# Altium footprint library Tony_.PcbLib: 94 footprints (part 5 of 6)
Each footprint in its own frame and in the unit in brackets; x right, y up, seen from the top. Pads: shape width x height; smd on the part's side, far side on the other; paste and mask are expansions set on the pad; w line width, h text height; cw(c..) or ccw(c..) is an arc to the next point about the centre after c.
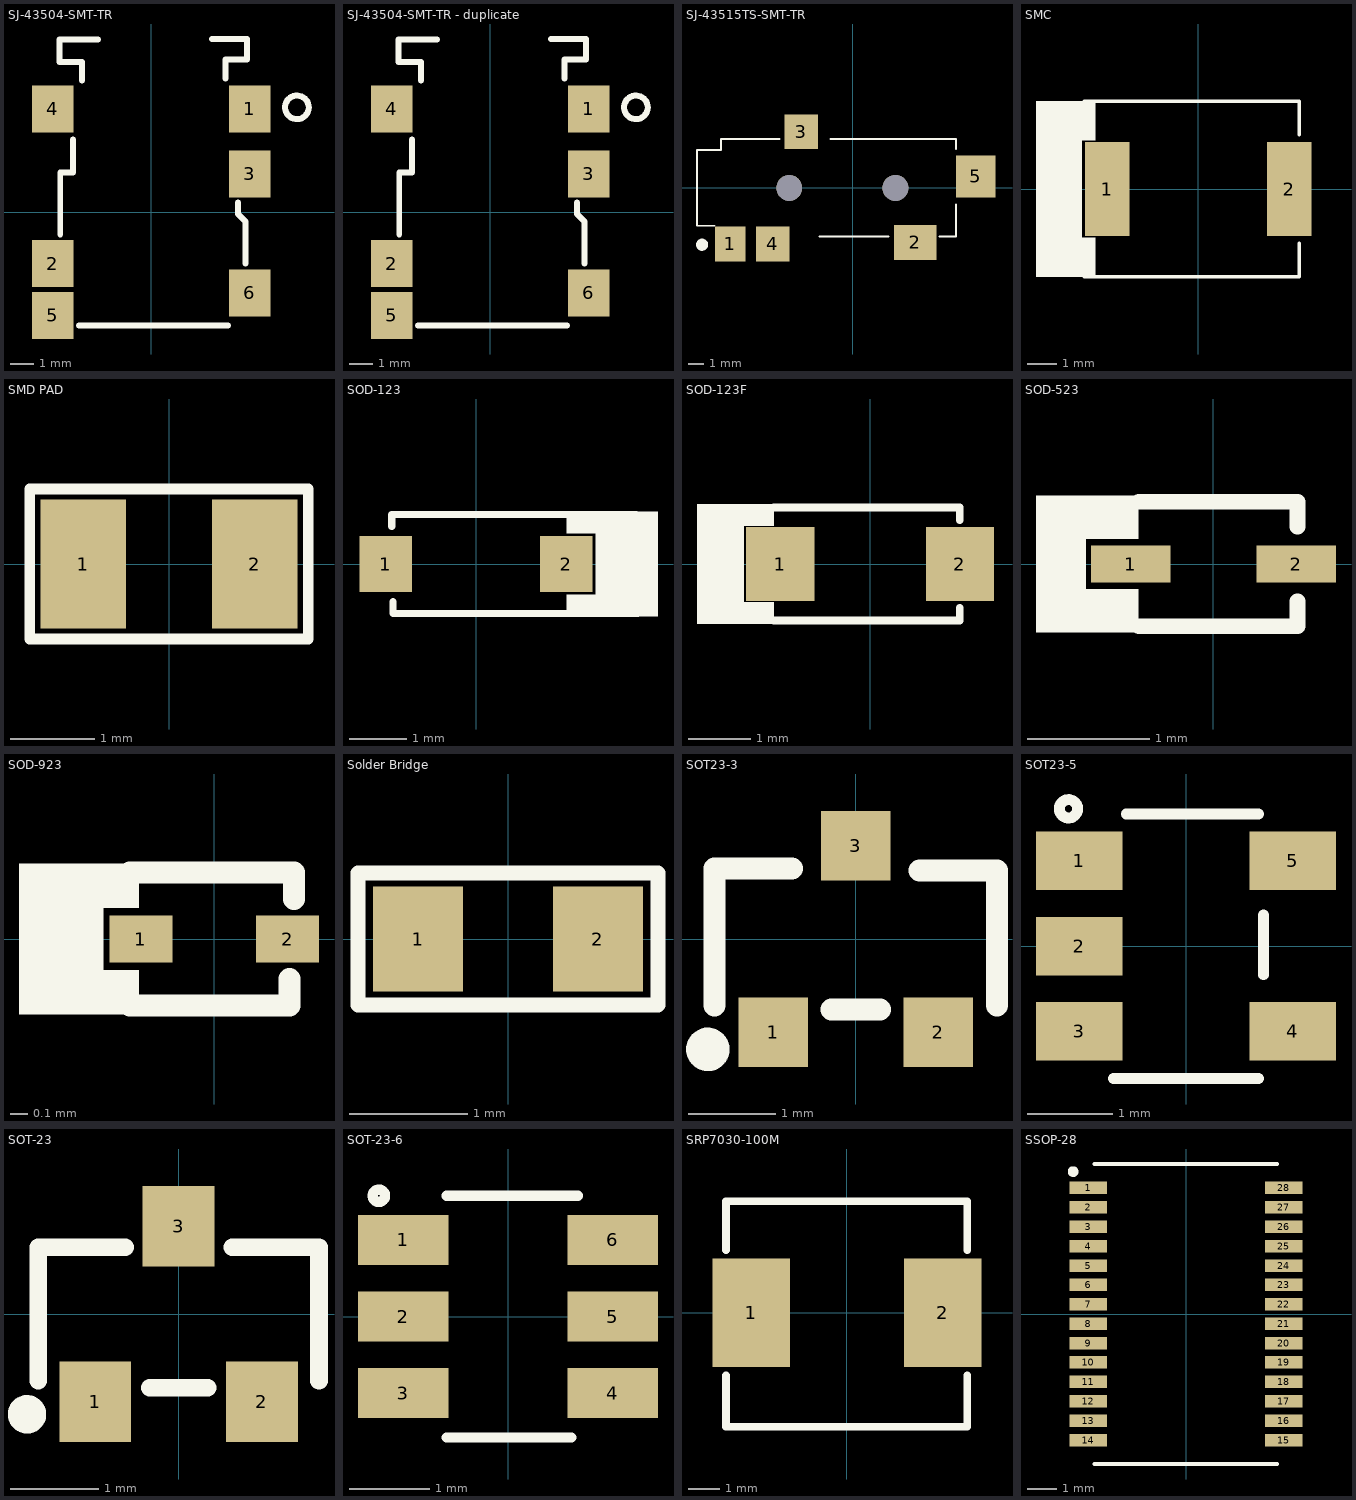
[diagram p4: the footprints below, top view; thin cyan lines are the x and y axes]

## SJ-43504-SMT-TR [mm] "CONN JACK 4COND 3.5MM SMD R/A"
pads (6):
  rect 1.75x2 smd: 1(4.175,4.375) 2(-4.175,-2.175) 3(4.175,1.625) 4(-4.175,4.375) 5(-4.175,-4.375) 6(4.175,-3.425)
Top Overlay:
  circle w0.254: c6.172,4.445 r0.5
  lines w0.254: -3.861,-0.94 -3.861,1.676 -3.327,1.676 -3.327,3.083 ; -3.067,-4.801 3.258,-4.801 ; -2.946,5.588 -2.946,6.375 -3.886,6.375 -3.886,7.324 -2.261,7.324 ; 2.565,7.341 4.064,7.341 4.064,6.477 3.15,6.477 3.15,5.664 ; 3.683,0.411 3.683,-0.08 3.988,-0.384 3.988,-2.167
3D body "CUI_DEVICES_SJ-43504-SMT-TR.step": height 3.2, standoff -1.8, extent -4.325,-4.308 4.775,9.692

## SJ-43504-SMT-TR - duplicate [mm] "CONN JACK 4COND 3.5MM SMD R/A"
pads (6):
  rect 1.75x2 smd: 1(4.175,4.375) 2(-4.175,-2.175) 3(4.175,1.625) 4(-4.175,4.375) 5(-4.175,-4.375) 6(4.175,-3.425)
Top Overlay:
  circle w0.254: c6.172,4.445 r0.5
  lines w0.254: -3.861,-0.94 -3.861,1.676 -3.327,1.676 -3.327,3.083 ; -3.067,-4.801 3.258,-4.801 ; -2.946,5.588 -2.946,6.375 -3.886,6.375 -3.886,7.324 -2.261,7.324 ; 2.565,7.341 4.064,7.341 4.064,6.477 3.15,6.477 3.15,5.664 ; 3.683,0.411 3.683,-0.08 3.988,-0.384 3.988,-2.167
3D body "CUI_DEVICES_SJ-43504-SMT-TR.step": height 3.2, standoff -1.8, extent -4.474,-4.801 4.626,9.199

## SJ-43515TS-SMT-TR [mm]
pads (7):
  rect 2x2.3 smd: 1(-8.1,-3.7)
  rect 2.8x2.3 smd: 2(4.1,-3.6)
  rect 2.2x2.3 smd: 3(-3.4,3.7) 4(-5.3,-3.7)
  rect 2.6x2.8 smd: 5(8.1,0.75)
  round 1.7 hole 1.7 unplated: ""(-4.2,0) ""(2.8,0)
Top Overlay:
  circle w0.4: c-9.95,-3.75 r0.2
  lines w0.127: -9.116,-2.5 -10.284,-2.5 -10.284,2.5 -8.7,2.5 -8.7,3.209 -4.825,3.209 ; -2.207,-3.217 2.339,-3.217 ; -1.496,3.209 6.8,3.209 6.8,2.55 ; 5.692,-3.217 6.8,-3.217 6.8,-1.1
3D body "CUI_DEVICES_SJ-43515TS-SMT-TR.step": height 5.3, standoff -0.5, extent -10.436,-4.547 8.764,4.453

## SMC [mm]
pads (2):
  rect 1.52x3.2 smd: 1(-3.105,0) 2(3.105,0)
Top Overlay:
  rectangle: -5.537,-1.753 -3.962,1.803
  rectangle: -5.537,-2.997 -3.505,-1.651
  rectangle: -5.537,1.651 -3.505,2.997
  lines w0.127: -3.886,-2.997 3.454,-2.997 3.454,-1.854 ; -3.886,2.997 3.454,2.997 3.454,1.854
3D body "User Library-DO-214AB-SMC.step": height 2.42, standoff -0.03, extent -3.9,-2.95 3.9,2.95

## SMD PAD [mil] "SMD 0805"
pads (2):
  rect 40x60 smd: 1(-40,0) 2(40,0)
Top Overlay:
  lines w5: -65,-35 -65,35 65,35 65,-35 -65,-35

## SOD-123 [mm]
pads (2):
  rect 0.92x0.97 smd: 1(-1.575,0) 2(1.575,0)
Top Overlay:
  region: 3.175,0.914 2.083,0.914 2.083,-0.914 3.175,-0.914
  rectangle: 1.575,0.533 2.21,0.914
  rectangle: 1.575,-0.914 2.21,-0.533
  lines w0.127: -1.473,0.661 -1.473,0.864 2.794,0.864 ; -1.448,-0.661 -1.448,-0.864 2.82,-0.864
3D body "CircuitWorks-SOD123.step": height 1.27, standoff 0, extent -1.85,-0.8 1.85,0.8

## SOD-123F [mm]
pads (2):
  rect 1.1x1.2 smd: 1(-1.45,0) 2(1.45,0)
Top Overlay:
  rectangle: -2.794,-0.889 -2.032,0.965
  rectangle: -2.794,-0.965 -1.549,-0.61
  rectangle: -2.718,0.61 -1.549,0.965
  lines w0.127: -1.549,-0.914 1.448,-0.914 1.448,-0.711 ; -1.549,0.914 1.448,0.914 1.448,0.711
3D body "User Library-SOD123F.step": height 1.2, standoff -0.01, extent -1.9,-0.85 1.85,0.85

## SOD-523 [mm]
pads (2):
  rect 0.65x0.3 smd: 1(-0.675,0) 2(0.675,0)
Top Overlay:
  rectangle: -1.448,-0.279 -1.041,0.254
  rectangle: -1.448,-0.559 -0.61,-0.203
  rectangle: -1.448,0.203 -0.61,0.559
  lines w0.127: -0.61,-0.508 0.686,-0.508 0.686,-0.305 ; -0.61,0.508 0.686,0.508 0.686,0.305
3D body "User Library-SOD523F.step": height 0.7, standoff 0, extent -0.85,-0.45 0.85,0.45

## SOD-923 [mm]
pads (2):
  rect 0.36x0.27 smd: 1(-0.42,0) 2(0.42,0)
Top Overlay:
  rectangle: -1.118,-0.432 -0.635,0.432
  rectangle: -1.118,-0.432 -0.432,-0.178
  rectangle: -1.118,0.178 -0.432,0.432
  lines w0.127: -0.483,-0.381 0.432,-0.381 0.432,-0.229 ; -0.483,0.381 0.457,0.381 0.457,0.229
3D body "User Library-DIODE_SOD-923.step": height 0.43, standoff 0, extent -0.525,-0.325 0.525,0.325

## Solder Bridge [mil] "Solder Bridge ON"
pads (2):
  rect 30x35 smd: 1(-30,0) 2(30,0)
Top Overlay:
  lines w5: -50,-22 -50,22 50,22 50,-22 -50,-22

## SOT23-3 [mm] "SOT23, 3-Leads, Body 2.9x1.3mm, Pitch 0.95mm, Lead Span 2.3mm - Reverse Pinning, IPC High Density"
height 1.1
pads (3):
  rect 0.8x0.8 smd: 1(-0.95,-1.075) 2(0.95,-1.075) 3(0,1.075)
Top Overlay:
  circle w0.25: c-1.702,-1.27 r0.125
  lines w0.254: -1.626,-0.762 -1.626,0.813 -0.737,0.813 ; -0.28,-0.813 0.279,-0.813 ; 0.736,0.787 1.625,0.787 1.625,-0.762
3D body "CircuitWorks-SOT-23.step": height 1.05, standoff -0.05, extent -1.5,-1.25 1.5,1.25

## SOT23-5 [mil] "SOT23-5 Package"
height 51.18
pads (5):
  rect 40x27 smd: 1(-49.21,39.37) 2(-49.21,0) 3(-49.21,-39.37) 4(49.21,-39.37) 5(49.21,39.37)
Top Overlay:
  circle w5: c-54.21,63.37 r4.24
  lines w5: -33.46,-61.02 33.46,-61.02 ; -27.56,61.02 33.46,61.02 ; 35.79,-13.19 35.79,14.37
3D body "User Library-SOT-23-5-1.STEP": height 43.31, standoff -0.06, extent -45.92,-58.19 52.51,59.92

## SOT-23 [mm] "TRANS NPN 40V 0.6A SOT23"
pads (3):
  rect 0.82x0.92 smd: 1(-0.95,-1) 2(0.95,-1) 3(0,1)
Top Overlay:
  circle w0.254: c-1.727,-1.143 r0.092
  lines w0.2: -1.6,-0.762 -1.6,0.762 -0.61,0.762 ; -0.33,-0.838 0.33,-0.838 ; 0.61,0.762 1.6,0.762 1.6,-0.762
3D body "CircuitWorks-SOT-23.step": height 1.05, standoff -0.05, extent -1.5,-1.25 1.5,1.25

## SOT-23-6 [mm] "IC BAT CHG LI-ION 1 CELL SOT23-6"
pads (6):
  rect 1.12x0.62 smd: 1(-1.3,0.95) 2(-1.3,0) 3(-1.3,-0.95) 4(1.3,-0.95) 5(1.3,0) 6(1.3,0.95)
Top Overlay:
  circle w0.127: c-1.6,1.499 r0.076
  lines w0.127: -0.762,-1.499 0.787,-1.499 ; -0.762,1.499 0.864,1.499
3D body "User Library-SOT23-6-2.step": height 1.44, standoff -0.01, extent -1.4,-1.45 1.4,1.45

## SRP7030-100M [mm] "FIXED IND 10UH 3A 85 MOHM SMD"
height 3.2
pads (2):
  rect 2.5x3.5 smd: 1(-3.1,0) 2(3.1,0)
Top Overlay:
  lines w0.254: -3.912,-2.032 -3.912,-3.683 3.886,-3.683 3.886,-2.032 ; -3.912,2.032 -3.912,3.607 3.886,3.607 3.886,2.032
3D body "srp7030.stp": height 3.11, standoff -0.09, extent -3.914,-3.531 3.886,3.469

## SSOP-28 [mm]
pads (28):
  rect 1.25x0.42 smd: 1(-3.275,4.225) 2(-3.275,3.575) 3(-3.275,2.925) 4(-3.275,2.275) 5(-3.275,1.625) 6(-3.275,0.975) 7(-3.275,0.325) 8(-3.275,-0.325) 9(-3.275,-0.975) 10(-3.275,-1.625) 11(-3.275,-2.275) 12(-3.275,-2.925) 13(-3.275,-3.575) 14(-3.275,-4.225) 15(3.275,-4.225) 16(3.275,-3.575) 17(3.275,-2.925) 18(3.275,-2.275) 19(3.275,-1.625) 20(3.275,-0.975) 21(3.275,-0.325) 22(3.275,0.325) 23(3.275,0.975) 24(3.275,1.625) 25(3.275,2.275) 26(3.275,2.925) 27(3.275,3.575) 28(3.275,4.225)
Top Overlay:
  circle w0.254: c-3.785,4.775 r0.051
  lines w0.127: -3.073,-5.029 3.048,-5.029 ; -3.073,5.029 3.048,5.029
3D body "User Library-ssop28_model.STEP": height 2.01, standoff 0.01, extent -3.9,-5.12 3.9,5.08